# Altium footprint library Grant_..PcbLib: 73 footprints (part 2 of 5)
Each footprint in its own frame and in the unit in brackets; x right, y up, seen from the top. Pads: shape width x height; smd on the part's side, far side on the other; paste and mask are expansions set on the pad; w line width, h text height; cw(c..) or ccw(c..) is an arc to the next point about the centre after c.
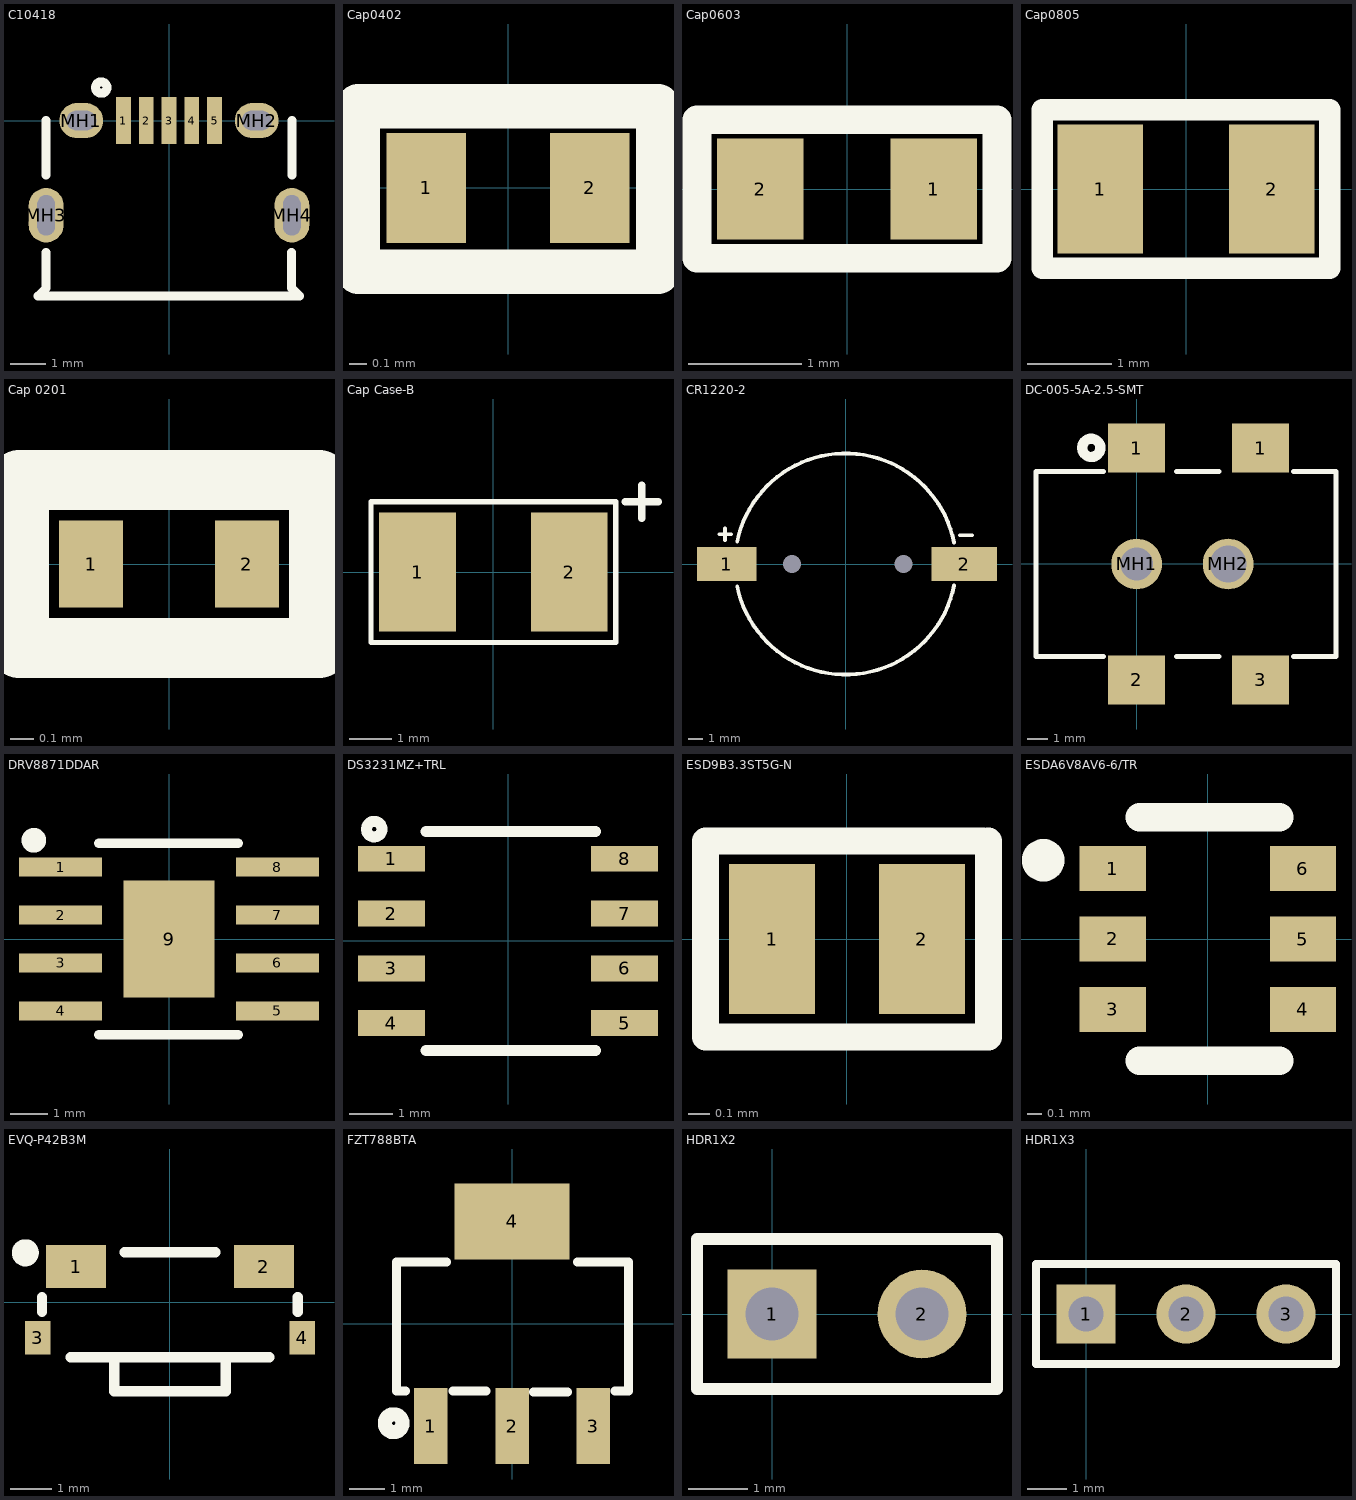
[diagram p1: the footprints below, top view; thin cyan lines are the x and y axes]

## C10418 [mm] "USB - Micro B Female USB 2 5 SMD USB Connectors RoHS"
pads (9):
  rect 0.42x1.35 smd: 1(-1.3,0) 2(-0.65,0) 3(0,0) 4(0.65,0) 5(1.3,0)
  oval 1.25x1 hole 0.55 slot 0.85 at 0 deg: MH1(-2.5,0) MH2(2.5,0)
  oval 1x1.55 hole 0.5 slot 1.15 at 90 deg: MH3(-3.5,-2.7) MH4(3.5,-2.7)
Top Overlay:
  circle w0.254: c-1.93,0.94 r0.163
  lines w0.254: -3.505,-3.765 -3.505,-4.765 -3.505,-4.775 -3.734,-5.004 3.723,-5.004 3.495,-4.775 ; -3.505,-1.549 -3.505,0 ; 3.495,-4.765 3.495,-3.765 ; 3.505,-1.549 3.505,0
3D body: height 0.25, standoff 0, extent -7.671,-3.81 -7.671,-3.81
3D body "10118194c.stp": height 2.72, standoff -0.55, extent -4.025,-5.385 4.025,0.195

## Cap0402 [mil]
pads (2):
  rect 18x25 smd: 1(-18.5,0) 2(18.5,0)
Top Overlay:
  lines w10: -34,-19 -34,18.5 34,18.5 34,-19 -34,-19
3D body "User Library-Capacitor 0402.step": height 18.5, standoff -1.18, extent -19.68,-9.84 19.7,9.85

## Cap0603 [mil]
pads (2):
  rect 30x35 smd: 1(30,0) 2(-30,0)
Top Overlay:
  lines w10: -52,-24 -52,24 52,24 52,-24 -52,-24
3D body "User Library-CAPC1608X09.step": height 34.25, standoff -1.18, extent -31.49,-15.74 31.51,15.76

## Cap0805 [mil] "SMD 0805"
pads (2):
  rect 40x60 smd: 1(-40,0) 2(40,0)
Top Overlay:
  lines w10: -67,-37 -67,37 67,37 67,-37 -67,-37
3D body "User Library-0805 SMD Capacitor.step": height 30, standoff -0.79, extent -39.36,-24.6 39.38,24.61

## Cap 0201 [mm]
pads (2):
  rect 0.27x0.37 smd: 1(-0.33,0) 2(0.33,0)
Top Overlay:
  lines w0.254: -0.635,-0.356 -0.635,0.356 0.635,0.356 0.635,-0.356 -0.635,-0.356
3D body "GRM033R60J104KE19D--3DModel-STEP-56544.STEP": height 0.21, standoff -0.09, extent -0.3,-0.165 0.3,0.165

## Cap Case-B [mil] "Case-B"
pads (2):
  rect 70.87x110 smd: 1(-70,0) 2(70,0)
Top Overlay:
  lines w5: -113,-65 -113,65 113,65 113,-65 -113,-65
  lines w7: 122,65 152,65 ; 137,50 137,80
3D body "User Library-AVX_BCASE.step": height 76.93, standoff -2.99, extent -72.84,-57.68 72.83,57.68

## CR1220-2 [mm]
pads (4):
  rect 4x2.3 smd: 1(-8,0)
  rect 4.4x2.3 smd: 2(8,0)
  round 0 hole 1.22: MH1(-3.6,0) MH2(3.9,0)
Top Overlay:
  lines w0.254: -8.502,2.007 -7.689,2.007 ; -8.121,1.6 -8.121,2.413 ; -7.297,-1.501 ccw(c0,0) 7.306,-1.456 ; -7.297,1.501 cw(c0,0) 7.306,1.456 ; 7.703,1.93 8.516,1.93
3D body "qj_cr1220-2.stp": height 4, standoff -0.5, extent -9.8,-7.45 9.9,7.45

## DC-005-5A-2.5-SMT [mm]
pads (6):
  rect 2.8x2.4 smd: 1(0,5.7) 1(6.1,5.7) 2(0,-5.7) 3(6.1,-5.7)
  round 2.5 hole 1.6 unplated: MH1(0,0)
  round 2.5 hole 1.8 unplated: MH2(4.5,0)
Top Overlay:
  circle w0.5: c-2.233,5.715 r0.449
  lines w0.254: -4.953,-4.557 -1.626,-4.557 ; -4.953,4.557 -1.626,4.557 ; -4.949,-4.557 -4.949,4.557 ; 1.956,-4.557 4.035,-4.557 ; 1.956,4.557 4.035,4.557 ; 7.726,-4.557 9.804,-4.557 9.805,4.557 7.726,4.557
3D body "CUI-PJ-002A-SMT.step": height 11.17, standoff -1.03, extent -4.987,-6.274 9.813,6.326

## DRV8871DDAR [mm]
pads (9):
  rect 2.2x0.5 smd: 1(-2.875,1.905) 2(-2.875,0.635) 3(-2.875,-0.635) 4(-2.875,-1.905) 5(2.875,-1.905) 6(2.875,-0.635) 7(2.875,0.635) 8(2.875,1.905)
  rect 2.4x3.1 smd: 9(0,0)
Top Overlay:
  circle w0.5: c-3.581,2.616 r0.076
  lines w0.254: -1.854,-2.54 1.829,-2.54 ; -1.854,2.54 1.829,2.54
3D body "LMR14050SDDAR--3DModel-STEP-56544.STEP": height 1.68, standoff -0.02, extent -3,-2.462 3,2.438

## DS3231MZ+TRL [mm]
pads (8):
  rect 1.55x0.6 smd: 1(-2.7,1.905) 2(-2.7,0.635) 3(-2.7,-0.635) 4(-2.7,-1.905) 5(2.7,-1.905) 6(2.7,-0.635) 7(2.7,0.635) 8(2.7,1.905)
Top Overlay:
  circle w0.254: c-3.099,2.591 r0.18
  lines w0.254: -1.905,-2.54 2.032,-2.54 ; -1.905,2.54 2.032,2.54
3D body "User Library-SOIC-8-1.STEP": height 1.65, standoff -0.1, extent -2.906,-2.413 3.094,2.487

## ESD9B3.3ST5G-N [mm] "TVS DIODE Bidirectional 3.3V (Max) 3.8V 8V 10A SOD923"
pads (2):
  rect 0.4x0.7 smd: 1(-0.35,0) 2(0.35,0)
Top Overlay:
  lines w0.127: 0.635,0.457 -0.66,0.457 -0.66,-0.457 0.66,-0.457 0.66,0.457
3D body "User Library-SOD-882D.step": height 0.43, standoff -0.04, extent -0.525,-0.325 0.525,0.325

## ESDA6V8AV6-6/TR [mm]
pads (6):
  rect 0.47x0.32 smd: 1(-0.675,0.5) 2(-0.675,0) 3(-0.675,-0.5) 4(0.675,-0.5) 5(0.675,0) 6(0.675,0.5)
Top Overlay:
  circle w0.2: c-1.168,0.559 r0.051
  lines w0.2: -0.483,-0.864 0.508,-0.864 ; -0.483,0.864 0.508,0.864
3D body "User Library-SOT-563.step": height 0.58, standoff 0, extent -0.813,-0.8 0.813,0.8

## EVQ-P42B3M [mm]
pads (4):
  rect 1.45x1.05 smd: 1(-2.275,0.863) 2(2.275,0.863)
  rect 0.62x0.82 smd: 3(-3.2,-0.863) 4(3.2,-0.863)
Top Overlay:
  circle w0.35: c-3.505,1.195 r0.152
  lines w0.254: -3.1,-0.238 -3.1,0.112 ; -2.4,-1.338 2.4,-1.338 ; -1.35,-1.388 -1.35,-2.163 1.35,-2.163 1.35,-1.388 ; -1.1,1.212 1.1,1.212 ; 3.1,-0.238 3.1,0.112
3D body "EVQP42B3M.STEP": height 2, standoff -1, extent -3.074,-2.132 3.126,1.368

## FZT788BTA [mm]
pads (4):
  rect 0.95x2.15 smd: 1(-2.3,-2.9) 2(0,-2.9) 3(2.3,-2.9)
  rect 3.25x2.15 smd: 4(0,2.9)
Top Overlay:
  circle w0.4: c-3.353,-2.819 r0.251
  lines w0.254: -3.023,-1.905 -3.277,-1.905 -3.277,1.753 -1.854,1.753 ; -1.676,-1.905 -0.737,-1.905 ; 0.61,-1.93 1.575,-1.93 ; 1.854,1.753 3.302,1.753 3.302,-1.905 2.921,-1.905
3D body "CircuitWorks-SOT-223.STEP": height 1.65, standoff -0.03, extent -3.275,-3.505 3.225,3.455

## HDR1X2 [mm] "CONN HEADER VERT 2POS 2.54MM"
pads (2):
  rect 1.5x1.5 hole 0.9: 1(0,0)
  round 1.5 hole 0.9: 2(2.54,0)
Top Overlay:
  lines w0.2: -1.27,-1.27 3.81,-1.27 3.81,1.27 -1.27,1.27 -1.27,-1.27
3D body "User Library-Header1x2.STEP": height 8.44, standoff -2.54, extent -1.27,-1.27 3.81,1.27

## HDR1X3 [mm] "Connector; Header; 3 Position"
pads (3):
  rect 1.5x1.5 hole 0.9: 1(0,0)
  round 1.5 hole 0.9: 2(2.54,0) 3(5.08,0)
Top Overlay:
  lines w0.2: -1.27,-1.27 -1.27,1.27 6.35,1.27 6.35,-1.27 -1.27,-1.27
3D body "User Library-Header_Male_3Pin.STEP": height 8.54, standoff -3, extent -1.27,-1.245 6.35,1.245